# Altium footprint library FTP.PcbLib: 207 footprints (part 8 of 13)
Each footprint in its own frame and in the unit in brackets; x right, y up, seen from the top. Pads: shape width x height; smd on the part's side, far side on the other; paste and mask are expansions set on the pad; w line width, h text height; cw(c..) or ccw(c..) is an arc to the next point about the centre after c.
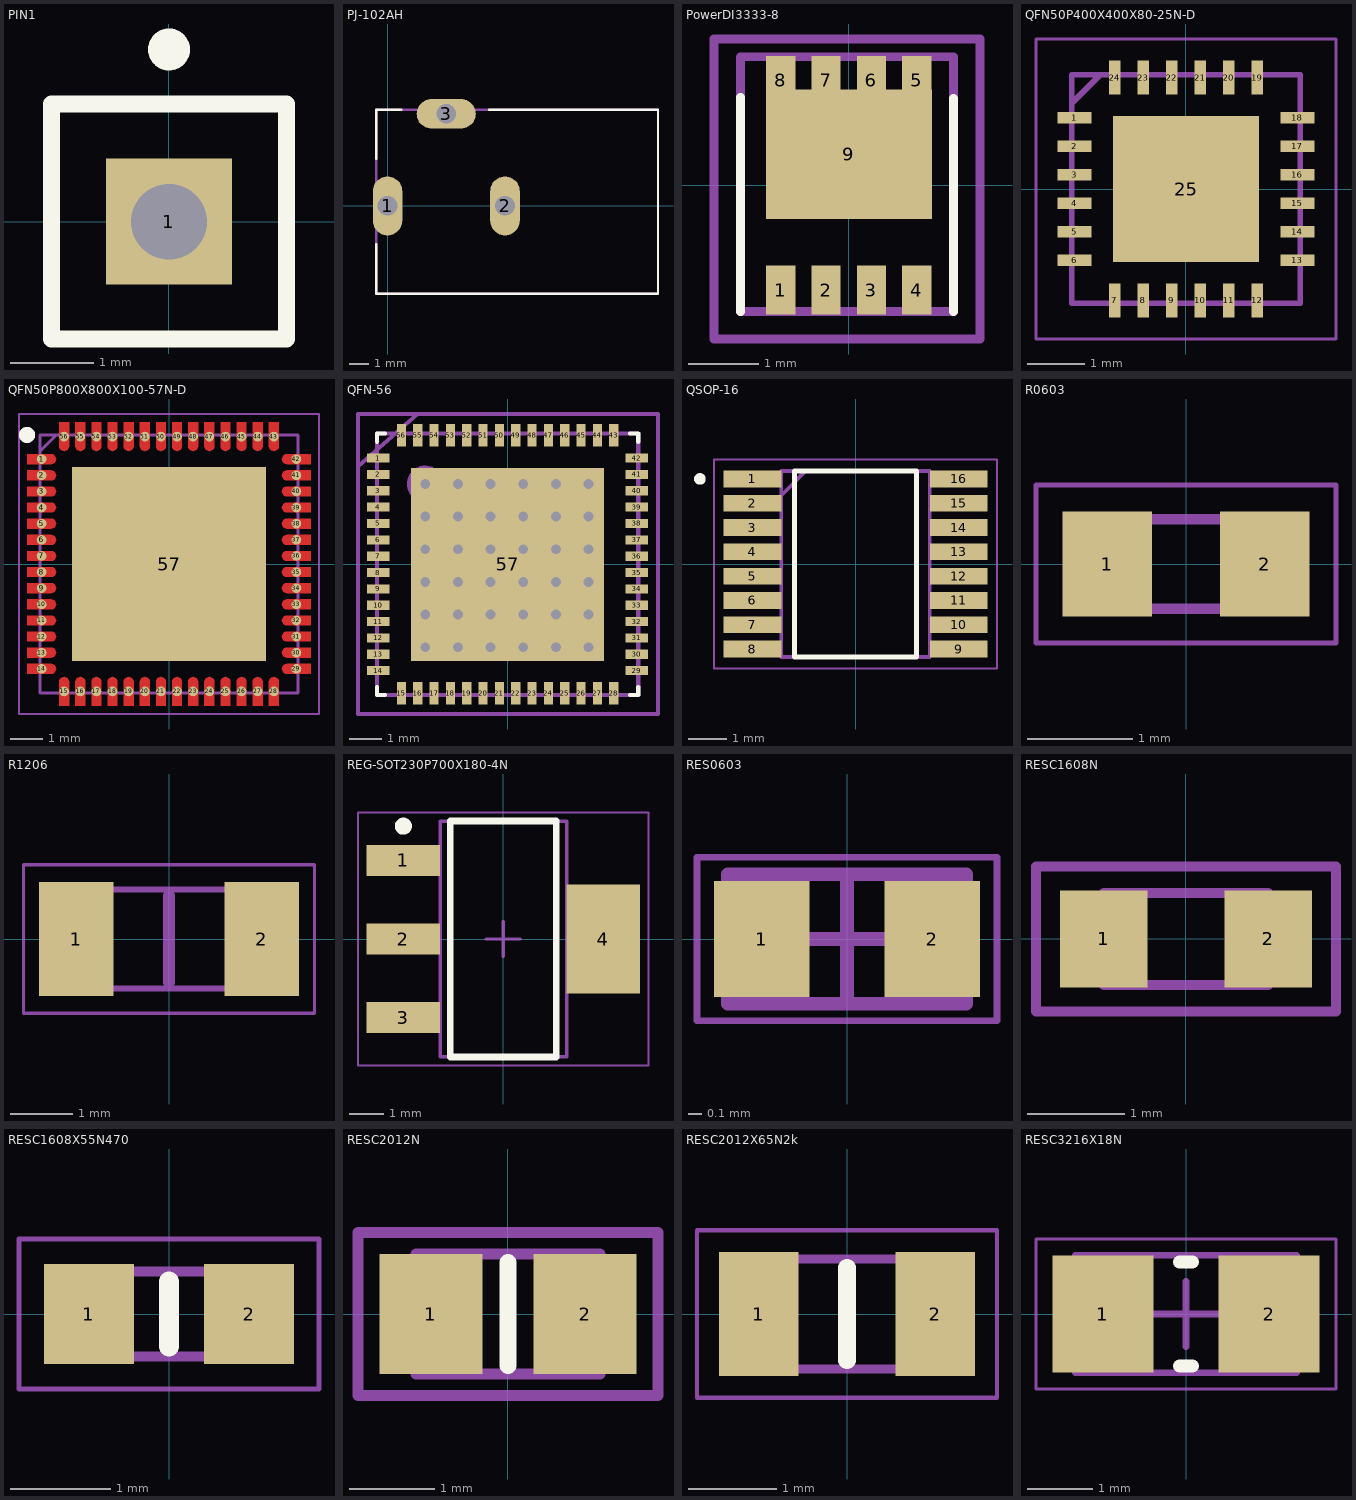
[diagram p7: the footprints below, top view; thin cyan lines are the x and y axes]

## PIN1 [mm] "Connector; Plug"
pads (1):
  rect 1.5x1.5 hole 0.9: 1(0,0)
Top Overlay:
  circle w0.25: c0,2.05 r0.125
  lines w0.2: -1.4,-1.4 1.4,-1.4 1.4,1.4 -1.4,1.4 -1.4,-1.4

## PJ-102AH [mm]
pads (3):
  oval 1.508x3.016 hole 1 square: 1(0,0) 2(6,0)
  oval 3.016x1.508 hole 1 square: 3(3,4.7)
Top Overlay:
  lines w0.127: -0.587,-1.968 -0.587,-4.484 13.813,-4.484 13.813,4.916 5.2,4.916 ; -0.587,2.4 -0.587,4.916 0.7,4.916
  text "." at -2.1,0 h0.76
Mechanical 13:
  lines w0.127: -0.587,-4.484 13.813,-4.484 13.813,4.916 -0.587,4.916 -0.587,-4.484
Mechanical 15:
  lines w0.127: -0.587,-4.484 13.813,-4.484 13.813,4.916 -0.587,4.916 -0.587,-4.484
3D body "CUI_DEVICES_PJ-102AH.step": height 11.05, standoff -3.45, extent -0.587,-4.484 13.813,4.916

## PowerDI3333-8 [mm]
pads (9):
  rect 0.42x0.7 smd paste-0.01 mask+0.07: 1(-0.975,-1.5) 2(-0.325,-1.5) 3(0.325,-1.5) 4(0.975,-1.5)
  rect 0.42x0.7 smd paste-10 mask+0.07: 5(0.975,1.5) 6(0.325,1.5) 7(-0.325,1.5) 8(-0.975,1.5)
  rect 2.37x1.85 smd paste-10 mask+0.07: 9(0.003,0.443)
Top Overlay:
  lines w0.127: -1.55,-1.808 -1.55,1.257 ; 1.5,-1.808 1.5,1.242
  text "." at -1.075,-2.7 h0.76
Top Paste:
  region: -0.114,-0.404 -0.114,0.627 -1.114,0.627 -1.114,-0.404
  region: 0.114,-0.404 0.114,0.627 1.096,0.627 1.096,-0.404
  region: 1.096,1.837 1.096,0.867 0.116,0.867 0.116,1.315 0.186,1.315 0.186,1.837 0.446,1.837 0.446,1.315 0.836,1.315 0.836,1.837
  region: -1.108,1.838 -1.108,0.868 -0.115,0.868 -0.115,1.316 -0.198,1.316 -0.198,1.838 -0.458,1.838 -0.458,1.316 -0.848,1.316 -0.848,1.838
Mechanical 13:
  lines w0.127: -1.55,-1.808 1.5,-1.808 1.5,1.837 -1.55,1.837 -1.55,-1.808
Mechanical 15:
  lines w0.127: -1.925,-2.2 -1.925,2.091 1.875,2.091 1.875,-2.2 -1.925,-2.2
  text "+" at -0.489,-0.763 h1.5
3D body "DMP3013SFV-7.stp": height 0.95, standoff 0, extent -1.55,-1.83 1.5,1.786

## QFN50P400X400X80-25N-D [mm]
pads (25):
  rect 0.6x0.2 smd: 1(-1.95,1.25) 2(-1.95,0.75) 3(-1.95,0.25) 4(-1.95,-0.25) 5(-1.95,-0.75) 6(-1.95,-1.25) 13(1.95,-1.25) 14(1.95,-0.75) 15(1.95,-0.25) 16(1.95,0.25) 17(1.95,0.75) 18(1.95,1.25)
  rect 0.2x0.6 smd: 7(-1.25,-1.95) 8(-0.75,-1.95) 9(-0.25,-1.95) 10(0.25,-1.95) 11(0.75,-1.95) 12(1.25,-1.95) 19(1.25,1.95) 20(0.75,1.95) 21(0.25,1.95) 22(-0.25,1.95) 23(-0.75,1.95) 24(-1.25,1.95)
  rect 2.55x2.55 smd: 25(0,0)
Mechanical 15:
  lines w0.05: -2.625,-2.625 -2.625,2.625 2.625,2.625 2.625,-2.625 -2.625,-2.625
  lines w0.1: -2,1.5 -1.5,2 ; -2,-2 2,-2 2,2 -2,2 -2,-2
3D body "CP2102N-A02-GQFN24.stp": height 0.8, standoff 0, extent -2.05,-2.05 2.05,2.05

## QFN50P800X800X100-57N-D [mm]
pads (57):
  round 0.3 smd: 1(-3.95,3.25) 2(-3.95,2.75) 3(-3.95,2.25) 4(-3.95,1.75) 5(-3.95,1.25) 6(-3.95,0.75) 7(-3.95,0.25) 8(-3.95,-0.25) 9(-3.95,-0.75) 10(-3.95,-1.25) 11(-3.95,-1.75) 12(-3.95,-2.25) 13(-3.95,-2.75) 14(-3.95,-3.25) 15(-3.25,-3.95) 16(-2.75,-3.95) 17(-2.25,-3.95) 18(-1.75,-3.95) 19(-1.25,-3.95) 20(-0.75,-3.95) 21(-0.25,-3.95) 22(0.25,-3.95) 23(0.75,-3.95) 24(1.25,-3.95) 25(1.75,-3.95) 26(2.25,-3.95) 27(2.75,-3.95) 28(3.25,-3.95) 29(3.95,-3.25) 30(3.95,-2.75) 31(3.95,-2.25) 32(3.95,-1.75) 33(3.95,-1.25) 34(3.95,-0.75) 35(3.95,-0.25) 36(3.95,0.25) 37(3.95,0.75) 38(3.95,1.25) 39(3.95,1.75) 40(3.95,2.25) 41(3.95,2.75) 42(3.95,3.25) 43(3.25,3.95) 44(2.75,3.95) 45(2.25,3.95) 46(1.75,3.95) 47(1.25,3.95) 48(0.75,3.95) 49(0.25,3.95) 50(-0.25,3.95) 51(-0.75,3.95) 52(-1.25,3.95) 53(-1.75,3.95) 54(-2.25,3.95) 55(-2.75,3.95) 56(-3.25,3.95)
  rrect0% 6x6 smd: 57(0,0)
Top Layer:
  region: -4.4,3.4 -3.65,3.401 -3.611,3.396 -3.574,3.381 -3.543,3.357 -3.519,3.326 -3.504,3.289 -3.499,3.25 -3.504,3.211 -3.519,3.174 -3.543,3.143 -3.574,3.119 -3.611,3.104 -3.65,3.099 -3.65,3.1 -4.4,3.1
  region: -4.4,2.9 -3.65,2.901 -3.611,2.896 -3.574,2.881 -3.543,2.857 -3.519,2.826 -3.504,2.789 -3.499,2.75 -3.504,2.711 -3.519,2.674 -3.543,2.643 -3.574,2.619 -3.611,2.604 -3.65,2.599 -3.65,2.6 -4.4,2.6
  region: -4.4,2.4 -3.65,2.401 -3.611,2.396 -3.574,2.381 -3.543,2.357 -3.519,2.326 -3.504,2.289 -3.499,2.25 -3.504,2.211 -3.519,2.174 -3.543,2.143 -3.574,2.119 -3.611,2.104 -3.65,2.099 -3.65,2.1 -4.4,2.1
  region: -4.4,1.9 -3.65,1.901 -3.611,1.896 -3.574,1.881 -3.543,1.857 -3.519,1.826 -3.504,1.789 -3.499,1.75 -3.504,1.711 -3.519,1.674 -3.543,1.643 -3.574,1.619 -3.611,1.604 -3.65,1.599 -3.65,1.6 -4.4,1.6
  region: -4.4,1.4 -3.65,1.401 -3.611,1.396 -3.574,1.381 -3.543,1.357 -3.519,1.326 -3.504,1.289 -3.499,1.25 -3.504,1.211 -3.519,1.174 -3.543,1.143 -3.574,1.119 -3.611,1.104 -3.65,1.099 -3.65,1.1 -4.4,1.1
  region: -4.4,0.9 -3.65,0.901 -3.611,0.896 -3.574,0.881 -3.543,0.857 -3.519,0.826 -3.504,0.789 -3.499,0.75 -3.504,0.711 -3.519,0.674 -3.543,0.643 -3.574,0.619 -3.611,0.604 -3.65,0.599 -3.65,0.6 -4.4,0.6
  region: -4.4,0.4 -3.65,0.401 -3.611,0.396 -3.574,0.381 -3.543,0.357 -3.519,0.326 -3.504,0.289 -3.499,0.25 -3.504,0.211 -3.519,0.174 -3.543,0.143 -3.574,0.119 -3.611,0.104 -3.65,0.099 -3.65,0.1 -4.4,0.1
  region: -4.4,-0.1 -3.65,-0.099 -3.611,-0.104 -3.574,-0.119 -3.543,-0.143 -3.519,-0.174 -3.504,-0.211 -3.499,-0.25 -3.504,-0.289 -3.519,-0.326 -3.543,-0.357 -3.574,-0.381 -3.611,-0.396 -3.65,-0.401 -3.65,-0.4 -4.4,-0.4
  region: -4.4,-0.6 -3.65,-0.599 -3.611,-0.604 -3.574,-0.619 -3.543,-0.643 -3.519,-0.674 -3.504,-0.711 -3.499,-0.75 -3.504,-0.789 -3.519,-0.826 -3.543,-0.857 -3.574,-0.881 -3.611,-0.896 -3.65,-0.901 -3.65,-0.9 -4.4,-0.9
  region: -4.4,-1.1 -3.65,-1.099 -3.611,-1.104 -3.574,-1.119 -3.543,-1.143 -3.519,-1.174 -3.504,-1.211 -3.499,-1.25 -3.504,-1.289 -3.519,-1.326 -3.543,-1.357 -3.574,-1.381 -3.611,-1.396 -3.65,-1.401 -3.65,-1.4 -4.4,-1.4
  region: -4.4,-1.6 -3.65,-1.599 -3.611,-1.604 -3.574,-1.619 -3.543,-1.643 -3.519,-1.674 -3.504,-1.711 -3.499,-1.75 -3.504,-1.789 -3.519,-1.826 -3.543,-1.857 -3.574,-1.881 -3.611,-1.896 -3.65,-1.901 -3.65,-1.9 -4.4,-1.9
  region: -4.4,-2.1 -3.65,-2.099 -3.611,-2.104 -3.574,-2.119 -3.543,-2.143 -3.519,-2.174 -3.504,-2.211 -3.499,-2.25 -3.504,-2.289 -3.519,-2.326 -3.543,-2.357 -3.574,-2.381 -3.611,-2.396 -3.65,-2.401 -3.65,-2.4 -4.4,-2.4
  region: -4.4,-2.6 -3.65,-2.599 -3.611,-2.604 -3.574,-2.619 -3.543,-2.643 -3.519,-2.674 -3.504,-2.711 -3.499,-2.75 -3.504,-2.789 -3.519,-2.826 -3.543,-2.857 -3.574,-2.881 -3.611,-2.896 -3.65,-2.901 -3.65,-2.9 -4.4,-2.9
  region: -4.4,-3.1 -3.65,-3.099 -3.611,-3.104 -3.574,-3.119 -3.543,-3.143 -3.519,-3.174 -3.504,-3.211 -3.499,-3.25 -3.504,-3.289 -3.519,-3.326 -3.543,-3.357 -3.574,-3.381 -3.611,-3.396 -3.65,-3.401 -3.65,-3.4 -4.4,-3.4
  region: -3.4,-4.4 -3.401,-3.65 -3.396,-3.611 -3.381,-3.574 -3.357,-3.543 -3.326,-3.519 -3.289,-3.504 -3.25,-3.499 -3.211,-3.504 -3.174,-3.519 -3.143,-3.543 -3.119,-3.574 -3.104,-3.611 -3.099,-3.65 -3.1,-3.65 -3.1,-4.4
  region: -2.9,-4.4 -2.901,-3.65 -2.896,-3.611 -2.881,-3.574 -2.857,-3.543 -2.826,-3.519 -2.789,-3.504 -2.75,-3.499 -2.711,-3.504 -2.674,-3.519 -2.643,-3.543 -2.619,-3.574 -2.604,-3.611 -2.599,-3.65 -2.6,-3.65 -2.6,-4.4
  region: -2.4,-4.4 -2.401,-3.65 -2.396,-3.611 -2.381,-3.574 -2.357,-3.543 -2.326,-3.519 -2.289,-3.504 -2.25,-3.499 -2.211,-3.504 -2.174,-3.519 -2.143,-3.543 -2.119,-3.574 -2.104,-3.611 -2.099,-3.65 -2.1,-3.65 -2.1,-4.4
  region: -1.9,-4.4 -1.901,-3.65 -1.896,-3.611 -1.881,-3.574 -1.857,-3.543 -1.826,-3.519 -1.789,-3.504 -1.75,-3.499 -1.711,-3.504 -1.674,-3.519 -1.643,-3.543 -1.619,-3.574 -1.604,-3.611 -1.599,-3.65 -1.6,-3.65 -1.6,-4.4
  region: -1.4,-4.4 -1.401,-3.65 -1.396,-3.611 -1.381,-3.574 -1.357,-3.543 -1.326,-3.519 -1.289,-3.504 -1.25,-3.499 -1.211,-3.504 -1.174,-3.519 -1.143,-3.543 -1.119,-3.574 -1.104,-3.611 -1.099,-3.65 -1.1,-3.65 -1.1,-4.4
  region: -0.9,-4.4 -0.901,-3.65 -0.896,-3.611 -0.881,-3.574 -0.857,-3.543 -0.826,-3.519 -0.789,-3.504 -0.75,-3.499 -0.711,-3.504 -0.674,-3.519 -0.643,-3.543 -0.619,-3.574 -0.604,-3.611 -0.599,-3.65 -0.6,-3.65 -0.6,-4.4
  region: -0.4,-4.4 -0.401,-3.65 -0.396,-3.611 -0.381,-3.574 -0.357,-3.543 -0.326,-3.519 -0.289,-3.504 -0.25,-3.499 -0.211,-3.504 -0.174,-3.519 -0.143,-3.543 -0.119,-3.574 -0.104,-3.611 -0.099,-3.65 -0.1,-3.65 -0.1,-4.4
  region: 0.1,-4.4 0.099,-3.65 0.104,-3.611 0.119,-3.574 0.143,-3.543 0.174,-3.519 0.211,-3.504 0.25,-3.499 0.289,-3.504 0.326,-3.519 0.357,-3.543 0.381,-3.574 0.396,-3.611 0.401,-3.65 0.4,-3.65 0.4,-4.4
  region: 0.6,-4.4 0.599,-3.65 0.604,-3.611 0.619,-3.574 0.643,-3.543 0.674,-3.519 0.711,-3.504 0.75,-3.499 0.789,-3.504 0.826,-3.519 0.857,-3.543 0.881,-3.574 0.896,-3.611 0.901,-3.65 0.9,-3.65 0.9,-4.4
  region: 1.1,-4.4 1.099,-3.65 1.104,-3.611 1.119,-3.574 1.143,-3.543 1.174,-3.519 1.211,-3.504 1.25,-3.499 1.289,-3.504 1.326,-3.519 1.357,-3.543 1.381,-3.574 1.396,-3.611 1.401,-3.65 1.4,-3.65 1.4,-4.4
  region: 1.6,-4.4 1.599,-3.65 1.604,-3.611 1.619,-3.574 1.643,-3.543 1.674,-3.519 1.711,-3.504 1.75,-3.499 1.789,-3.504 1.826,-3.519 1.857,-3.543 1.881,-3.574 1.896,-3.611 1.901,-3.65 1.9,-3.65 1.9,-4.4
  region: 2.1,-4.4 2.099,-3.65 2.104,-3.611 2.119,-3.574 2.143,-3.543 2.174,-3.519 2.211,-3.504 2.25,-3.499 2.289,-3.504 2.326,-3.519 2.357,-3.543 2.381,-3.574 2.396,-3.611 2.401,-3.65 2.4,-3.65 2.4,-4.4
  region: 2.6,-4.4 2.599,-3.65 2.604,-3.611 2.619,-3.574 2.643,-3.543 2.674,-3.519 2.711,-3.504 2.75,-3.499 2.789,-3.504 2.826,-3.519 2.857,-3.543 2.881,-3.574 2.896,-3.611 2.901,-3.65 2.9,-3.65 2.9,-4.4
  region: 3.1,-4.4 3.099,-3.65 3.104,-3.611 3.119,-3.574 3.143,-3.543 3.174,-3.519 3.211,-3.504 3.25,-3.499 3.289,-3.504 3.326,-3.519 3.357,-3.543 3.381,-3.574 3.396,-3.611 3.401,-3.65 3.4,-3.65 3.4,-4.4
  region: 4.4,-3.4 3.65,-3.401 3.611,-3.396 3.574,-3.381 3.543,-3.357 3.519,-3.326 3.504,-3.289 3.499,-3.25 3.504,-3.211 3.519,-3.174 3.543,-3.143 3.574,-3.119 3.611,-3.104 3.65,-3.099 3.65,-3.1 4.4,-3.1
  region: 4.4,-2.9 3.65,-2.901 3.611,-2.896 3.574,-2.881 3.543,-2.857 3.519,-2.826 3.504,-2.789 3.499,-2.75 3.504,-2.711 3.519,-2.674 3.543,-2.643 3.574,-2.619 3.611,-2.604 3.65,-2.599 3.65,-2.6 4.4,-2.6
  region: 4.4,-2.4 3.65,-2.401 3.611,-2.396 3.574,-2.381 3.543,-2.357 3.519,-2.326 3.504,-2.289 3.499,-2.25 3.504,-2.211 3.519,-2.174 3.543,-2.143 3.574,-2.119 3.611,-2.104 3.65,-2.099 3.65,-2.1 4.4,-2.1
  region: 4.4,-1.9 3.65,-1.901 3.611,-1.896 3.574,-1.881 3.543,-1.857 3.519,-1.826 3.504,-1.789 3.499,-1.75 3.504,-1.711 3.519,-1.674 3.543,-1.643 3.574,-1.619 3.611,-1.604 3.65,-1.599 3.65,-1.6 4.4,-1.6
  region: 4.4,-1.4 3.65,-1.401 3.611,-1.396 3.574,-1.381 3.543,-1.357 3.519,-1.326 3.504,-1.289 3.499,-1.25 3.504,-1.211 3.519,-1.174 3.543,-1.143 3.574,-1.119 3.611,-1.104 3.65,-1.099 3.65,-1.1 4.4,-1.1
  region: 4.4,-0.9 3.65,-0.901 3.611,-0.896 3.574,-0.881 3.543,-0.857 3.519,-0.826 3.504,-0.789 3.499,-0.75 3.504,-0.711 3.519,-0.674 3.543,-0.643 3.574,-0.619 3.611,-0.604 3.65,-0.599 3.65,-0.6 4.4,-0.6
  region: 4.4,-0.4 3.65,-0.401 3.611,-0.396 3.574,-0.381 3.543,-0.357 3.519,-0.326 3.504,-0.289 3.499,-0.25 3.504,-0.211 3.519,-0.174 3.543,-0.143 3.574,-0.119 3.611,-0.104 3.65,-0.099 3.65,-0.1 4.4,-0.1
  region: 4.4,0.1 3.65,0.099 3.611,0.104 3.574,0.119 3.543,0.143 3.519,0.174 3.504,0.211 3.499,0.25 3.504,0.289 3.519,0.326 3.543,0.357 3.574,0.381 3.611,0.396 3.65,0.401 3.65,0.4 4.4,0.4
  region: 4.4,0.6 3.65,0.599 3.611,0.604 3.574,0.619 3.543,0.643 3.519,0.674 3.504,0.711 3.499,0.75 3.504,0.789 3.519,0.826 3.543,0.857 3.574,0.881 3.611,0.896 3.65,0.901 3.65,0.9 4.4,0.9
  region: 4.4,1.1 3.65,1.099 3.611,1.104 3.574,1.119 3.543,1.143 3.519,1.174 3.504,1.211 3.499,1.25 3.504,1.289 3.519,1.326 3.543,1.357 3.574,1.381 3.611,1.396 3.65,1.401 3.65,1.4 4.4,1.4
  region: 4.4,1.6 3.65,1.599 3.611,1.604 3.574,1.619 3.543,1.643 3.519,1.674 3.504,1.711 3.499,1.75 3.504,1.789 3.519,1.826 3.543,1.857 3.574,1.881 3.611,1.896 3.65,1.901 3.65,1.9 4.4,1.9
  region: 4.4,2.1 3.65,2.099 3.611,2.104 3.574,2.119 3.543,2.143 3.519,2.174 3.504,2.211 3.499,2.25 3.504,2.289 3.519,2.326 3.543,2.357 3.574,2.381 3.611,2.396 3.65,2.401 3.65,2.4 4.4,2.4
  region: 4.4,2.6 3.65,2.599 3.611,2.604 3.574,2.619 3.543,2.643 3.519,2.674 3.504,2.711 3.499,2.75 3.504,2.789 3.519,2.826 3.543,2.857 3.574,2.881 3.611,2.896 3.65,2.901 3.65,2.9 4.4,2.9
  region: 4.4,3.1 3.65,3.099 3.611,3.104 3.574,3.119 3.543,3.143 3.519,3.174 3.504,3.211 3.499,3.25 3.504,3.289 3.519,3.326 3.543,3.357 3.574,3.381 3.611,3.396 3.65,3.401 3.65,3.4 4.4,3.4
  region: 3.4,4.4 3.401,3.65 3.396,3.611 3.381,3.574 3.357,3.543 3.326,3.519 3.289,3.504 3.25,3.499 3.211,3.504 3.174,3.519 3.143,3.543 3.119,3.574 3.104,3.611 3.099,3.65 3.1,3.65 3.1,4.4
  region: 2.9,4.4 2.901,3.65 2.896,3.611 2.881,3.574 2.857,3.543 2.826,3.519 2.789,3.504 2.75,3.499 2.711,3.504 2.674,3.519 2.643,3.543 2.619,3.574 2.604,3.611 2.599,3.65 2.6,3.65 2.6,4.4
  region: 2.4,4.4 2.401,3.65 2.396,3.611 2.381,3.574 2.357,3.543 2.326,3.519 2.289,3.504 2.25,3.499 2.211,3.504 2.174,3.519 2.143,3.543 2.119,3.574 2.104,3.611 2.099,3.65 2.1,3.65 2.1,4.4
  region: 1.9,4.4 1.901,3.65 1.896,3.611 1.881,3.574 1.857,3.543 1.826,3.519 1.789,3.504 1.75,3.499 1.711,3.504 1.674,3.519 1.643,3.543 1.619,3.574 1.604,3.611 1.599,3.65 1.6,3.65 1.6,4.4
  region: 1.4,4.4 1.401,3.65 1.396,3.611 1.381,3.574 1.357,3.543 1.326,3.519 1.289,3.504 1.25,3.499 1.211,3.504 1.174,3.519 1.143,3.543 1.119,3.574 1.104,3.611 1.099,3.65 1.1,3.65 1.1,4.4
  region: 0.9,4.4 0.901,3.65 0.896,3.611 0.881,3.574 0.857,3.543 0.826,3.519 0.789,3.504 0.75,3.499 0.711,3.504 0.674,3.519 0.643,3.543 0.619,3.574 0.604,3.611 0.599,3.65 0.6,3.65 0.6,4.4
  region: 0.4,4.4 0.401,3.65 0.396,3.611 0.381,3.574 0.357,3.543 0.326,3.519 0.289,3.504 0.25,3.499 0.211,3.504 0.174,3.519 0.143,3.543 0.119,3.574 0.104,3.611 0.099,3.65 0.1,3.65 0.1,4.4
  region: -0.1,4.4 -0.099,3.65 -0.104,3.611 -0.119,3.574 -0.143,3.543 -0.174,3.519 -0.211,3.504 -0.25,3.499 -0.289,3.504 -0.326,3.519 -0.357,3.543 -0.381,3.574 -0.396,3.611 -0.401,3.65 -0.4,3.65 -0.4,4.4
  region: -0.6,4.4 -0.599,3.65 -0.604,3.611 -0.619,3.574 -0.643,3.543 -0.674,3.519 -0.711,3.504 -0.75,3.499 -0.789,3.504 -0.826,3.519 -0.857,3.543 -0.881,3.574 -0.896,3.611 -0.901,3.65 -0.9,3.65 -0.9,4.4
  region: -1.1,4.4 -1.099,3.65 -1.104,3.611 -1.119,3.574 -1.143,3.543 -1.174,3.519 -1.211,3.504 -1.25,3.499 -1.289,3.504 -1.326,3.519 -1.357,3.543 -1.381,3.574 -1.396,3.611 -1.401,3.65 -1.4,3.65 -1.4,4.4
  region: -1.6,4.4 -1.599,3.65 -1.604,3.611 -1.619,3.574 -1.643,3.543 -1.674,3.519 -1.711,3.504 -1.75,3.499 -1.789,3.504 -1.826,3.519 -1.857,3.543 -1.881,3.574 -1.896,3.611 -1.901,3.65 -1.9,3.65 -1.9,4.4
  region: -2.1,4.4 -2.099,3.65 -2.104,3.611 -2.119,3.574 -2.143,3.543 -2.174,3.519 -2.211,3.504 -2.25,3.499 -2.289,3.504 -2.326,3.519 -2.357,3.543 -2.381,3.574 -2.396,3.611 -2.401,3.65 -2.4,3.65 -2.4,4.4
  region: -2.6,4.4 -2.599,3.65 -2.604,3.611 -2.619,3.574 -2.643,3.543 -2.674,3.519 -2.711,3.504 -2.75,3.499 -2.789,3.504 -2.826,3.519 -2.857,3.543 -2.881,3.574 -2.896,3.611 -2.901,3.65 -2.9,3.65 -2.9,4.4
  region: -3.1,4.4 -3.099,3.65 -3.104,3.611 -3.119,3.574 -3.143,3.543 -3.174,3.519 -3.211,3.504 -3.25,3.499 -3.289,3.504 -3.326,3.519 -3.357,3.543 -3.381,3.574 -3.396,3.611 -3.401,3.65 -3.4,3.65 -3.4,4.4
Top Overlay:
  circle w0.25: c-4.4,4 r0.125
Mechanical 15:
  lines w0.1: -4,3.5 -3.5,4 ; -4,-4 4,-4 4,4 -4,4 -4,-4
Mechanical 20:
  lines w0.05: -4.65,-4.65 4.65,-4.65 4.65,4.65 -4.65,4.65 -4.65,-4.65
3D body "LAN9500A-ABZJ-TR.stp": height 1, standoff 0, extent -4.05,-4.05 4.05,4.05

## QFN-56 [mm]
pads (57):
  rect 0.69x0.28 smd mask+0.07: 1(-3.95,3.25) 2(-3.95,2.75) 3(-3.95,2.25) 4(-3.95,1.75) 5(-3.95,1.25) 6(-3.95,0.75) 7(-3.95,0.25) 8(-3.95,-0.25) 9(-3.95,-0.75) 10(-3.95,-1.25) 11(-3.95,-1.75) 12(-3.95,-2.25) 13(-3.95,-2.75) 14(-3.95,-3.25) 29(3.95,-3.25) 30(3.95,-2.75) 31(3.95,-2.25) 32(3.95,-1.75) 33(3.95,-1.25) 34(3.95,-0.75) 35(3.95,-0.25) 36(3.95,0.25) 37(3.95,0.75) 38(3.95,1.25) 39(3.95,1.75) 40(3.95,2.25) 41(3.95,2.75) 42(3.95,3.25)
  rect 0.28x0.69 smd mask+0.07: 15(-3.25,-3.95) 16(-2.75,-3.95) 17(-2.25,-3.95) 18(-1.75,-3.95) 19(-1.25,-3.95) 20(-0.75,-3.95) 21(-0.25,-3.95) 22(0.25,-3.95) 23(0.75,-3.95) 24(1.25,-3.95) 25(1.75,-3.95) 26(2.25,-3.95) 27(2.75,-3.95) 28(3.25,-3.95) 43(3.25,3.95) 44(2.75,3.95) 45(2.25,3.95) 46(1.75,3.95) 47(1.25,3.95) 48(0.75,3.95) 49(0.25,3.95) 50(-0.25,3.95) 51(-0.75,3.95) 52(-1.25,3.95) 53(-1.75,3.95) 54(-2.25,3.95) 55(-2.75,3.95) 56(-3.25,3.95)
  rrect0% 5.9x5.9 smd mask+0.07: 57(0,0)
via -2.519,-2.539 diameter 0.7 hole 0.3
via -1.519,-2.539 diameter 0.7 hole 0.3
via -0.519,-2.539 diameter 0.7 hole 0.3
via 0.481,-2.539 diameter 0.7 hole 0.3
via 1.481,-2.539 diameter 0.7 hole 0.3
via 2.481,-2.539 diameter 0.7 hole 0.3
via -2.519,-1.539 diameter 0.7 hole 0.3
via -1.519,-1.539 diameter 0.7 hole 0.3
via -0.519,-1.539 diameter 0.7 hole 0.3
via 0.481,-1.539 diameter 0.7 hole 0.3
via 1.481,-1.539 diameter 0.7 hole 0.3
via 2.481,-1.539 diameter 0.7 hole 0.3
via -2.519,-0.539 diameter 0.7 hole 0.3
via -1.519,-0.539 diameter 0.7 hole 0.3
via -0.519,-0.539 diameter 0.7 hole 0.3
via 0.481,-0.539 diameter 0.7 hole 0.3
via 1.481,-0.539 diameter 0.7 hole 0.3
via 2.481,-0.539 diameter 0.7 hole 0.3
via -2.519,0.461 diameter 0.7 hole 0.3
via -1.519,0.461 diameter 0.7 hole 0.3
via -0.519,0.461 diameter 0.7 hole 0.3
via 0.481,0.461 diameter 0.7 hole 0.3
via 1.481,0.461 diameter 0.7 hole 0.3
via 2.481,0.461 diameter 0.7 hole 0.3
via -2.519,1.461 diameter 0.7 hole 0.3
via -1.519,1.461 diameter 0.7 hole 0.3
via -0.519,1.461 diameter 0.7 hole 0.3
via 0.481,1.461 diameter 0.7 hole 0.3
via 1.481,1.461 diameter 0.7 hole 0.3
via 2.481,1.461 diameter 0.7 hole 0.3
via -2.519,2.461 diameter 0.7 hole 0.3
via -1.519,2.461 diameter 0.7 hole 0.3
via -0.519,2.461 diameter 0.7 hole 0.3
via 0.481,2.461 diameter 0.7 hole 0.3
via 1.481,2.461 diameter 0.7 hole 0.3
via 2.481,2.461 diameter 0.7 hole 0.3
Top Overlay:
  lines w0.127: -3.999,-3.752 -3.999,-4.002 -3.749,-4.002 ; -3.999,3.75 -3.999,4 -3.749,4 ; 3.749,4.001 3.999,4.001 3.999,3.751 ; 3.751,-3.999 4.001,-3.999 4.001,-3.749
  text "." at -5.4,3.2 h0.76
Mechanical 13:
  circle w0.127: c-2.519,2.461 r0.5
  lines w0.127: -3.999,-4 -3.999,4.002 4,4.002 4,-4 -3.999,-4
Mechanical 15:
  lines w0.127: -4.571,2.997 -2.75,4.6 ; -4.573,-4.579 4.6,-4.579 4.6,4.6 -4.573,4.6 -4.573,-4.579
  text "+" at -0.493,-0.748 h1.5
3D body "LAN7500I-ABZJ.stp": height 1, standoff 0, extent -4.05,-4.05 4.05,4.05

## QSOP-16 [mm]
pads (16):
  rect 1.52x0.44 smd: 1(-2.715,2.24) 2(-2.715,1.6) 3(-2.715,0.96) 4(-2.715,0.32) 5(-2.715,-0.32) 6(-2.715,-0.96) 7(-2.715,-1.6) 8(-2.715,-2.24) 9(2.715,-2.24) 10(2.715,-1.6) 11(2.715,-0.96) 12(2.715,-0.32) 13(2.715,0.32) 14(2.715,0.96) 15(2.715,1.6) 16(2.715,2.24)
Top Overlay:
  circle w0.152: c-4.1,2.24 r0.076
  lines w0.127: -1.605,-2.45 1.605,-2.45 1.605,2.45 -1.605,2.45 -1.605,-2.45
Mechanical 13:
  lines w0.1: -1.955,1.81 -1.315,2.45 ; -1.955,-2.45 1.955,-2.45 1.955,2.45 -1.955,2.45 -1.955,-2.45
Mechanical 15:
  lines w0.05: -3.725,-2.75 3.725,-2.75 3.725,2.75 -3.725,2.75 -3.725,-2.75
3D body "ADG794BRQZ.stp": height 1.75, standoff 0, extent -2.997,-2.45 2.997,2.45

## R0603 [mm]
pads (2):
  rect 0.85x1 smd: 1(-0.75,0) 2(0.75,0)
Bottom Assembly:
  lines w0.05: -1.425,-0.75 -1.425,0.75 1.425,0.75 1.425,-0.75 -1.425,-0.75
  lines w0.1: -0.788,-0.425 -0.788,0.425 0.788,0.425 0.788,-0.425 -0.788,-0.425
3D body "Resistor_0603_Ohm.step": height 0.47, standoff 0.01, extent -0.87,-0.419 0.73,0.381

## R1206 [mm]
pads (2):
  rect 1.2x1.85 smd: 1(-1.5,0) 2(1.5,0)
3D Body Bottom:
  lines w0.2: 0,-0.7 0,0.7
Bottom Assembly:
  lines w0.05: -2.35,-1.2 2.35,-1.2 2.35,1.2 -2.35,1.2 -2.35,-1.2
  lines w0.1: -1.6,-0.8 1.6,-0.8 1.6,0.8 -1.6,0.8 -1.6,-0.8
3D body "Resistor_SMD_0,25W_1206.stp": height 0.85, standoff 0, extent -1.6,-0.8 1.6,0.8

## REG-SOT230P700X180-4N [mm] "SOT223, 4-Leads, Body 6.60x7.00mm (avg), Pitch 2.30mm, IPC Medium Density"
height 1.8
pads (4):
  rect 2.15x0.9 smd: 1(-2.925,2.3) 2(-2.925,0) 3(-2.925,-2.3)
  rect 2.15x3.2 smd: 4(2.925,0)
Top Overlay:
  circle w0.25: c-2.925,3.3 r0.125
  lines w0.2: -1.55,-3.45 1.55,-3.45 1.55,3.45 -1.55,3.45 -1.55,-3.45
Assembly Top:
  lines w0.1: -1.85,-3.45 1.85,-3.45 1.85,3.45 -1.85,3.45 -1.85,-3.45
Courtyard Top:
  lines w0.05: -4.25,-3.7 4.25,-3.7 4.25,3.7 -4.25,3.7 -4.25,-3.7
  lines w0.1: -0.5,0 0.5,0 ; 0,-0.5 0,0.5
3D body: height 1.8, standoff 0.24, extent -1.85,-3.45 1.85,3.45

## RES0603 [mm] "Chip Resistor, 2-Leads, Body 1.60x0.80mm, IPC High Density"
height 0.55
pads (2):
  rect 0.7x0.85 smd: 1(-0.625,0) 2(0.625,0)
Mechanical 13:
  lines w0.1: -0.875,-0.475 -0.875,0.475 0.875,0.475 0.875,-0.475 -0.875,-0.475
Mechanical 15:
  lines w0.05: -1.1,-0.6 -1.1,0.6 1.1,0.6 1.1,-0.6 -1.1,-0.6
  lines w0.1: -0.475,0 0.475,0 ; 0,-0.475 0,0.475
3D body: height 0.55, standoff 0, extent -0.575,-0.475 0.575,0.475
3D body: height 0.55, standoff 0, extent -0.875,-0.475 -0.575,0.475
3D body: height 0.55, standoff 0, extent 0.575,-0.475 0.875,0.475

## RESC1608N [mm] "Chip Resistor, Body 1.6x0.8mm, IPC Medium Density"
height 0.6
pads (2):
  rect 0.9x1 smd: 1(-0.85,0) 2(0.85,0)
Mechanical 13:
  lines w0.1: -0.85,-0.475 0.85,-0.475 0.85,0.475 -0.85,0.475 -0.85,-0.475
Mechanical 15:
  lines w0.1: -1.55,-0.75 1.55,-0.75 1.55,0.75 -1.55,0.75 -1.55,-0.75
3D body "CRCW0603160RFKEA.stp": height 0.5, standoff 0, extent -0.787,-0.425 0.788,0.425

## RESC1608X55N470 [mm]
pads (2):
  rect 0.9x1 smd: 1(-0.8,0) 2(0.8,0)
Top Overlay:
  lines w0.2: 0,-0.325 0,0.325
Mechanical 15:
  lines w0.1: -0.8,-0.425 -0.8,0.425 0.8,0.425 0.8,-0.425 -0.8,-0.425
Mechanical 20:
  lines w0.05: -1.5,-0.75 -1.5,0.75 1.5,0.75 1.5,-0.75 -1.5,-0.75
3D body "ERJ-3EKF4700V.stp": height 0.55, standoff 0, extent -0.8,-0.425 0.8,0.425

## RESC2012N [mm] "Chip Resistor, Body 2.0x1.3mm, IPC Medium Density"
height 0.65
pads (2):
  rect 1.2x1.4 smd: 1(-0.9,0) 2(0.9,0)
Top Overlay:
  lines w0.2: 0,-0.6 0,0.6
Mechanical 13:
  lines w0.127: -1.075,-0.7 -1.075,0.7 1.075,0.7 1.075,-0.7 -1.075,-0.7
Mechanical 15:
  lines w0.127: -1.75,-0.95 -1.75,0.95 1.75,0.95 1.75,-0.95 -1.75,-0.95
  text "+" at -0.501,-0.764 h1.5
3D body: height 0.65, standoff 0, extent -1.075,-0.7 1.075,0.7

## RESC2012X65N2k [mm]
pads (2):
  rect 0.9x1.4 smd: 1(-1,0) 2(1,0)
Top Overlay:
  lines w0.2: 0,-0.525 0,0.525
Mechanical 15:
  lines w0.1: -1,-0.625 1,-0.625 1,0.625 -1,0.625 -1,-0.625
Mechanical 20:
  lines w0.05: -1.7,-0.95 1.7,-0.95 1.7,0.95 -1.7,0.95 -1.7,-0.95
3D body "ESR10EZPF2001.stp": height 0.65, standoff 0, extent -1,-0.625 1,0.625

## RESC3216X18N [mm] "Chip Resistor, 2-Leads, Body 3.20x1.60mm, IPC Medium Density"
height 1.8
pads (2):
  rect 1.55x1.8 smd: 1(-1.275,0) 2(1.275,0)
Top Overlay:
  lines w0.2: -0.1,-0.8 0.1,-0.8 ; -0.1,0.8 0.1,0.8
Assembly Top:
  lines w0.1: -1.7,-0.9 1.7,-0.9 1.7,0.9 -1.7,0.9 -1.7,-0.9
Courtyard Top:
  lines w0.05: -2.3,-1.15 2.3,-1.15 2.3,1.15 -2.3,1.15 -2.3,-1.15
  lines w0.1: -0.5,0 0.5,0 ; 0,-0.5 0,0.5
3D body: height 1.8, standoff 0, extent 1,-0.9 1.7,0.9
3D body: height 1.8, standoff 0, extent -1.7,-0.9 -1,0.9
3D body: height 1.8, standoff 0, extent -1,-0.9 1,0.9